# Altium schematic symbol library RC-Car_Components.SchLib: 6 symbols
Pins are listed as number, name and electrical type; pins without a type are passive.

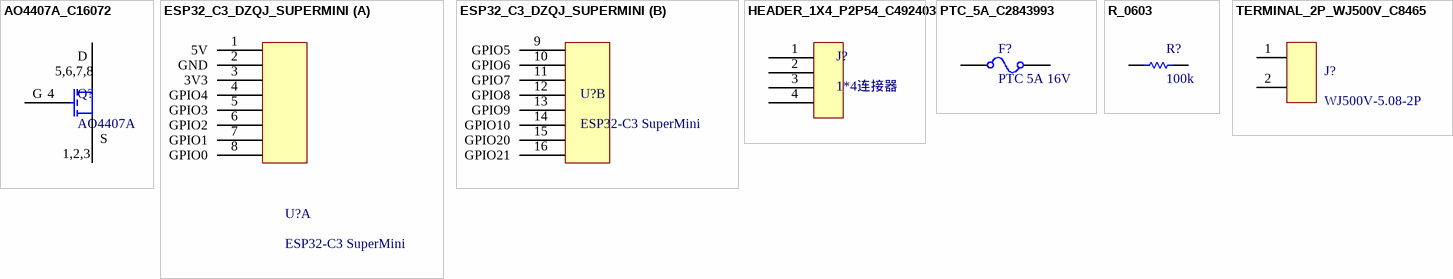
[diagram p0: symbols AO4407A_C16072 to TERMINAL_2P_WJ500V_C8465]

## AO4407A_C16072
designator Q?, comment AO4407A
AO4407A P沟道功率MOSFET，SOIC-8封装; Supplier Part Number: C16072
footprint SOIC-8_L4.9-W3.9-P1.27-LS6.0-BL
pins: 1 S, 2 S, 3 S, 4 G, 5 D, 6 D, 7 D, 8 D
text: 5,6,7,8; 1,2,3

## ESP32_C3_DZQJ_SUPERMINI
designator U?, comment ESP32-C3 SuperMini
DZQJ ESP32-C3 SuperMini开发板，双排各8针
part A pins: 1 5V, 2 GND, 3 3V3, 4 GPIO4, 5 GPIO3, 6 GPIO2, 7 GPIO1, 8 GPIO0
part B pins: 9 GPIO5, 10 GPIO6, 11 GPIO7, 12 GPIO8, 13 GPIO9, 14 GPIO10, 15 GPIO20, 16 GPIO21

## HEADER_1X4_P2P54_C492403
designator J?, comment 1*4连接器
单排4位直插公排针，2.54mm间距
footprint HDR-TH_4P-P2.54-V-M
pins: 1, 2, 3, 4

## PTC_5A_C2843993
designator F?, comment PTC 5A 16V
贴片自恢复保险丝，保持电流5A，动作电流10A，额定电压16V，1812封装; Supplier Part Number: C2843993
footprint F1812
pins: 1, 2

## R_0603
designator R?, comment 100k
100kΩ贴片电阻，0603封装
footprint R0603
pins: 1, 2

## TERMINAL_2P_WJ500V_C8465
designator J?, comment WJ500V-5.08-2P
2位螺钉接线端子，5.08mm间距，通孔安装; Supplier Part Number: C8465
footprint CONN-TH_2P-P5.00_WJ500V-5.08-2P
pins: 1, 2